# Altium footprint library Connectors.PcbLib: 304 footprints (part 15 of 19)
Each footprint in its own frame and in the unit in brackets; x right, y up, seen from the top. Pads: shape width x height; smd on the part's side, far side on the other; paste and mask are expansions set on the pad; w line width, h text height; cw(c..) or ccw(c..) is an arc to the next point about the centre after c.
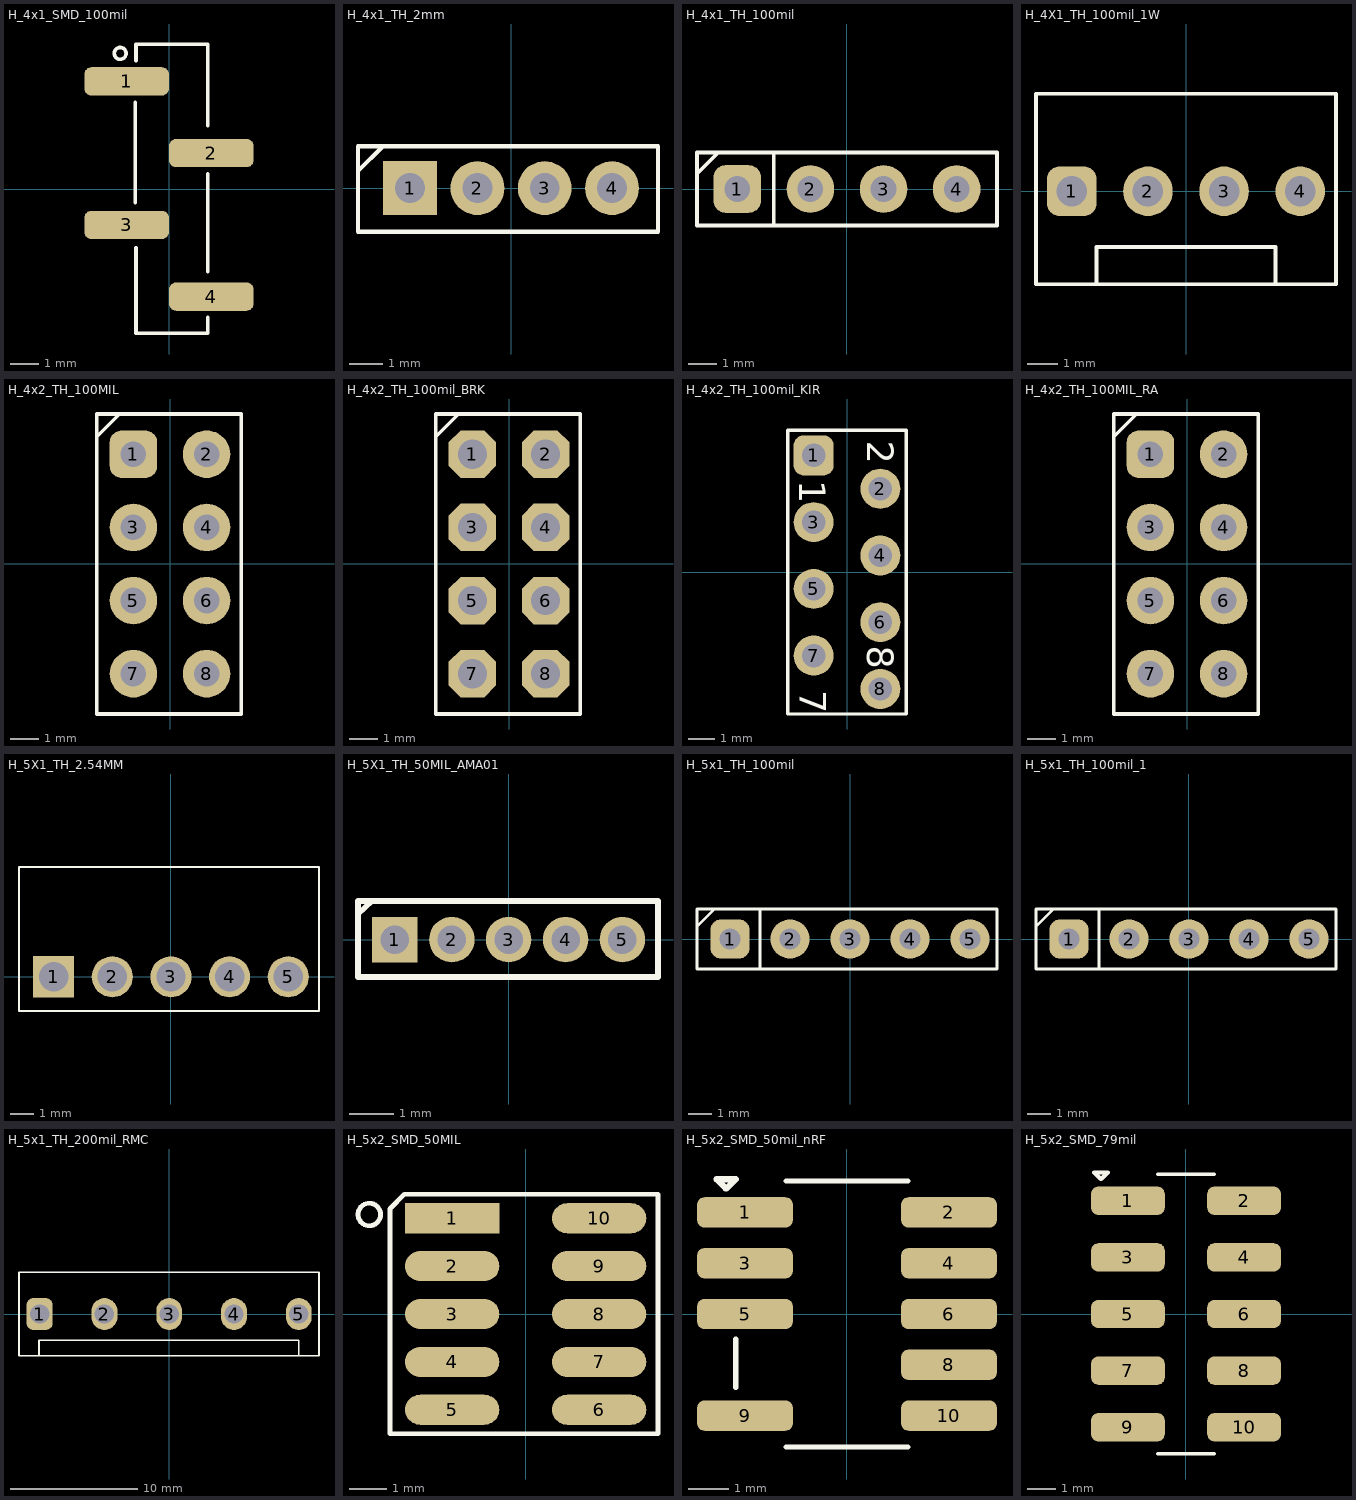
[diagram p14: the footprints below, top view; thin cyan lines are the x and y axes]

## H_4x1_SMD_100mil [mm] "/ 20190221 / C-A.Serna.A"
pads (4):
  rrect50% 3x1 smd: 1(-1.5,3.81) 2(1.5,1.27) 3(-1.5,-1.27) 4(1.5,-3.81)
Top Overlay:
  circle w0.127: c-1.727,4.801 r0.209
  lines w0.127: -1.194,-0.483 -1.194,3.073 ; -1.168,-2.083 -1.168,-5.029 -1.168,-5.105 1.372,-5.105 1.372,-4.547 ; -1.168,4.547 -1.168,5.131 1.372,5.131 1.372,2.235 ; 1.372,-2.921 1.372,0.533
3D body "Download_STP_61000418221 (rev1).stp": height 9.27, standoff -0.06, extent -2.425,-5.08 2.575,5.08

## H_4x1_TH_2mm [mm] "/20210714/M-C.Calderon"
pads (4):
  rect 1.6x1.6 hole 0.889: 1(-3,0)
  round 1.6 hole 0.889: 2(-1,0) 3(1,0) 4(3,0)
Top Overlay:
  lines w0.127: -4.549,0.505 -3.809,1.245 ; -4.549,-1.295 -4.549,1.245 4.366,1.245 4.366,-1.295 -4.549,-1.295
3D body "m22-2010405_asm.stp": height 5.01, standoff -3.39, extent -4.006,-0.988 3.994,1.012

## H_4x1_TH_100mil [mil] "/ 20190222 / C-A.Serna.A"
pads (4):
  rrect50% 65x65 hole 35: 1(-150,0)
  round 65 hole 35: 2(-50,0) 3(50,0) 4(150,0)
Top Overlay:
  lines w5: -205,20.87 -175.87,50 ; -100,-50 -100,50 ; -205,-50 205.12,-50 205.12,50 -205,50 -205,-50

## H_4X1_TH_100mil_1W [mil] "/20200319/C-A.Serna.A"
pads (4):
  rrect50% 65x65 hole 40: 1(-150,0)
  round 65 hole 40: 2(-50,0) 3(50,0) 4(150,0)
Top Overlay:
  lines w5: -117.5,-122 -117.5,-73 117.5,-73 117.5,-122 ; -197,-122 -197,128 197,128 197,-122 -197,-122
3D body "022232041.stp": height 428.37, standoff -131.63, extent -197,-122 197,128

## H_4x2_TH_100MIL [mil] "/ 20210215 / M-C.Calderon"
pads (8):
  rrect50% 65x65 hole 35: 1(-50,150)
  round 65 hole 35: 2(50,150) 3(-50,50) 4(50,50) 5(-50,-50) 6(50,-50) 7(-50,-150) 8(50,-150)
Top Overlay:
  lines w5: -100,174.02 -70.08,203.94 ; -100,-205.12 -100,205 97.24,205 97.24,-205.12 -100,-205.12

## H_4x2_TH_100mil_BRK [mil] "/20210423/M-C.Calderon"
pads (8):
  oct 65x65 hole 40: 1(-50,150) 2(50,150) 3(-50,50) 4(50,50) 5(-50,-50) 6(50,-50) 7(-50,-150) 8(50,-150)
Top Overlay:
  lines w5: -100,174.02 -70.08,203.94 ; -100,-205.12 97.24,-205.12 97.24,205 -100,205 -100,-205.12

## H_4x2_TH_100mil_KIR [mil] "/ 20190221 / C-A.Serna.A"
pads (8):
  rrect50% 60x60 hole 35: 1(-50,175)
  round 60 hole 35: 2(50,125) 3(-50,75) 4(50,25) 5(-50,-25) 6(50,-75) 7(-50,-125) 8(50,-175)
Top Overlay:
  lines w5: -88.58,-212.52 -88.58,212.68 88.58,212.68 88.58,-212.52 -88.58,-212.52
  text "1" at -71.38,137.87 h40
  text "2" at 30,197 h40
  text "7" at -71,-177 h40
  text "8" at 30,-110.16 h40

## H_4x2_TH_100MIL_RA [mil] "/ 20210827 / N-A.Potosi"
pads (8):
  rrect50% 65x65 hole 35: 1(-50,150)
  round 65 hole 35: 2(50,150) 3(-50,50) 4(50,50) 5(-50,-50) 6(50,-50) 7(-50,-150) 8(50,-150)
Top Overlay:
  lines w5: -100,174.02 -70.08,203.94 ; -100,-205.12 -100,205 97.24,205 97.24,-205.12 -100,-205.12
3D body "825457-4--3DModel-STEP-1.STEP": height 242.63, standoff -125.48, extent -62.29,-200.91 483.18,199.09

## H_5X1_TH_2.54MM [mil] "/20210218/J-E.Pachon"
pads (5):
  rect 70x70 hole 50: 1(-200,0)
  round 70 hole 50: 2(-100,0) 3(0,0) 4(100,0) 5(200,0)
Top Overlay:
  lines w3.94: -258.97,-58.27 -258.97,187.01 252.36,187.01 252.36,-58.27 -258.97,-58.27
3D body "022288053.stp": height 98.5, standoff -134.5, extent -252.36,-12.25 247.64,484.74

## H_5X1_TH_50MIL_AMA01 [mil] "20220517 / E.Naranjo"
pads (5):
  rect 40x40 hole 25: 1(-100,0)
  round 40 hole 25: 2(-50,0) 3(0,0) 4(50,0) 5(100,0)
Top Overlay:
  lines w5: -132.48,22.5 -120,34 ; -132.48,-32.93 131.3,-32.93 131.3,34 -132.48,34 -132.48,-32.93

## H_5x1_TH_100mil [mil] "/ 20190222 / C-A.Serna.A"
pads (5):
  rrect50% 65x65 hole 35: 1(-200,0)
  round 65 hole 35: 2(-100,0) 3(0,0) 4(100,0) 5(200,0)
Top Overlay:
  lines w5: -255,20.87 -225.87,50 ; -150,-50 -150,50 ; -255,-50 -255,50 245,50 245,-50 -255,-50

## H_5x1_TH_100mil_1 [mil] "/ 20191121 / J-P.Vargas.A"
pads (5):
  rrect50% 65x65 hole 35: 1(-200,0)
  round 65 hole 35: 2(-100,0) 3(0,0) 4(100,0) 5(200,0)
Top Overlay:
  lines w5: -255,20.87 -225.87,50 ; -150,-50 -150,50 ; -255,-50 -255,50 245,50 245,-50 -255,-50
3D body "CircuitWorks-HEADER 2_54 VERTICAL 5X.STEP": height 335.15, standoff -97.93, extent -250.01,-49.21 249.99,49.21

## H_5x1_TH_200mil_RMC [mil] "/ 20200321/ C-A.Serna.A"
pads (5):
  rrect50% 80x98.43 hole 60 unplated: 1(-400,0)
  oval 80x98.43 hole 60 unplated: 2(-200,0) 3(0,0) 4(200,0) 5(400,0)
Top Overlay:
  lines w5: -402.01,-128.66 -402.01,-81.11 400,-81.11 400,-128.66 ; -463.76,-128.66 462.4,-128.66 462.4,128.82 -463.76,128.82 -463.76,-128.66
3D body "010011054.stp": height 765.75, standoff 139.76, extent -499,-83.01 501,153.21
3D body "010085051.stp": height 582.28, standoff -166.93, extent -459.32,-124.63 458.79,125.36

## H_5x2_SMD_50MIL [mm] "/20200728/M-C.Calderon"
pads (10):
  rect 2.5x0.8 smd: 1(-1.95,2.54)
  oval 2.5x0.8 smd: 2(-1.95,1.27) 3(-1.95,0) 4(-1.95,-1.27) 5(-1.95,-2.54) 6(1.95,-2.54) 7(1.95,-1.27) 8(1.95,0) 9(1.95,1.27) 10(1.95,2.54)
Top Overlay:
  circle w0.127: c-4.15,2.64 r0.3
  lines w0.127: -0.318,3.175 3.511,3.175 3.511,-3.175 -3.601,-3.175 -3.601,2.794 -3.22,3.175 0.318,3.175
3D body "20021121-00010.stp": height 4.5, standoff 0, extent -2.75,-3.195 2.75,3.155

## H_5x2_SMD_50mil_nRF [mm] "/ 20200218/ C-A.Serna.A"
pads (9):
  rrect50% 2.4x0.76 smd: 1(-2.55,2.54) 2(2.55,2.54) 3(-2.55,1.27) 4(2.55,1.27) 5(-2.55,0) 6(2.55,0) 8(2.55,-1.27) 9(-2.55,-2.54) 10(2.55,-2.54)
Top Overlay:
  lines w0.127: -2.781,-1.841 -2.781,-0.621 ; -1.53,-3.32 1.518,-3.32 ; -1.53,3.327 1.518,3.327
  lines w0.152: -3.031,3.14 -3.26,3.369 -2.781,3.369 -3.01,3.14 ; -3.031,3.14 -3.01,3.14 ; -3.031,3.14 -3.01,3.14
3D body "Heade_10Pos_SMD_1.27mm_2row_1.27mm.stp": height 4.52, standoff 0.02, extent -2.76,-3.15 2.74,3.2
3D body "5x2_50mil_plug.step": height 6.67, standoff 1.57, extent -2.55,-5.3 1.47,5.3

## H_5x2_SMD_79mil [mm] "/ 20190909 / C-D Viveros"
pads (10):
  rrect50% 2.6x1 smd: 1(-2.05,4) 2(2.05,4) 3(-2.05,2) 4(2.05,2) 5(-2.05,0) 6(2.05,0) 7(-2.05,-2) 8(2.05,-2) 9(-2.05,-4) 10(2.05,-4)
Top Overlay:
  lines w0.127: -1,-4.937 1,-4.937 ; -1,4.936 1,4.936
  lines w0.152: -3.013,4.77 -2.992,4.77 ; -3.013,4.77 -2.992,4.77 ; -3.013,4.77 -3.242,5 -2.763,5 -2.992,4.77
3D body "57202-G52-05LFc.stp": height 6.51, standoff 0.01, extent -3.002,-5 3.003,5